# EAGLE library part IC_AT24CM01 (library dp_devices.v6)
AT24CM01 I2C 1-Mbit Serial EEPROM
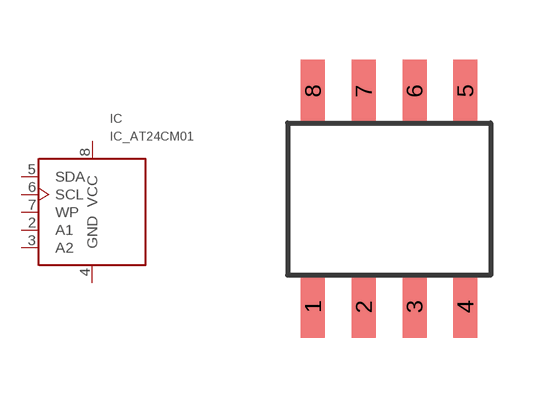
[diagram p190: symbol with the pads of SO-8; footprint SO-8]

Designator prefix IC

## IC_AT24CM01  [SO-8]
2  A1  in
3  A2  in
4  GND  sup
5  SDA
6  SCL  in
7  WP  in
8  VCC  sup

## Footprint SO-8 (pad centres in mm)
smd 0.6 x 1.55: 1 -1.905,-2.69; 2 -0.635,-2.69; 3 0.635,-2.69; 4 1.905,-2.69; 5 1.905,2.71; 6 0.635,2.71; 7 -0.635,2.71; 8 -1.905,2.71